# Altium footprint library StandardCase.PcbLib: 209 footprints (part 4 of 14)
Each footprint in its own frame and in the unit in brackets; x right, y up, seen from the top. Pads: shape width x height; smd on the part's side, far side on the other; paste and mask are expansions set on the pad; w line width, h text height; cw(c..) or ccw(c..) is an arc to the next point about the centre after c.
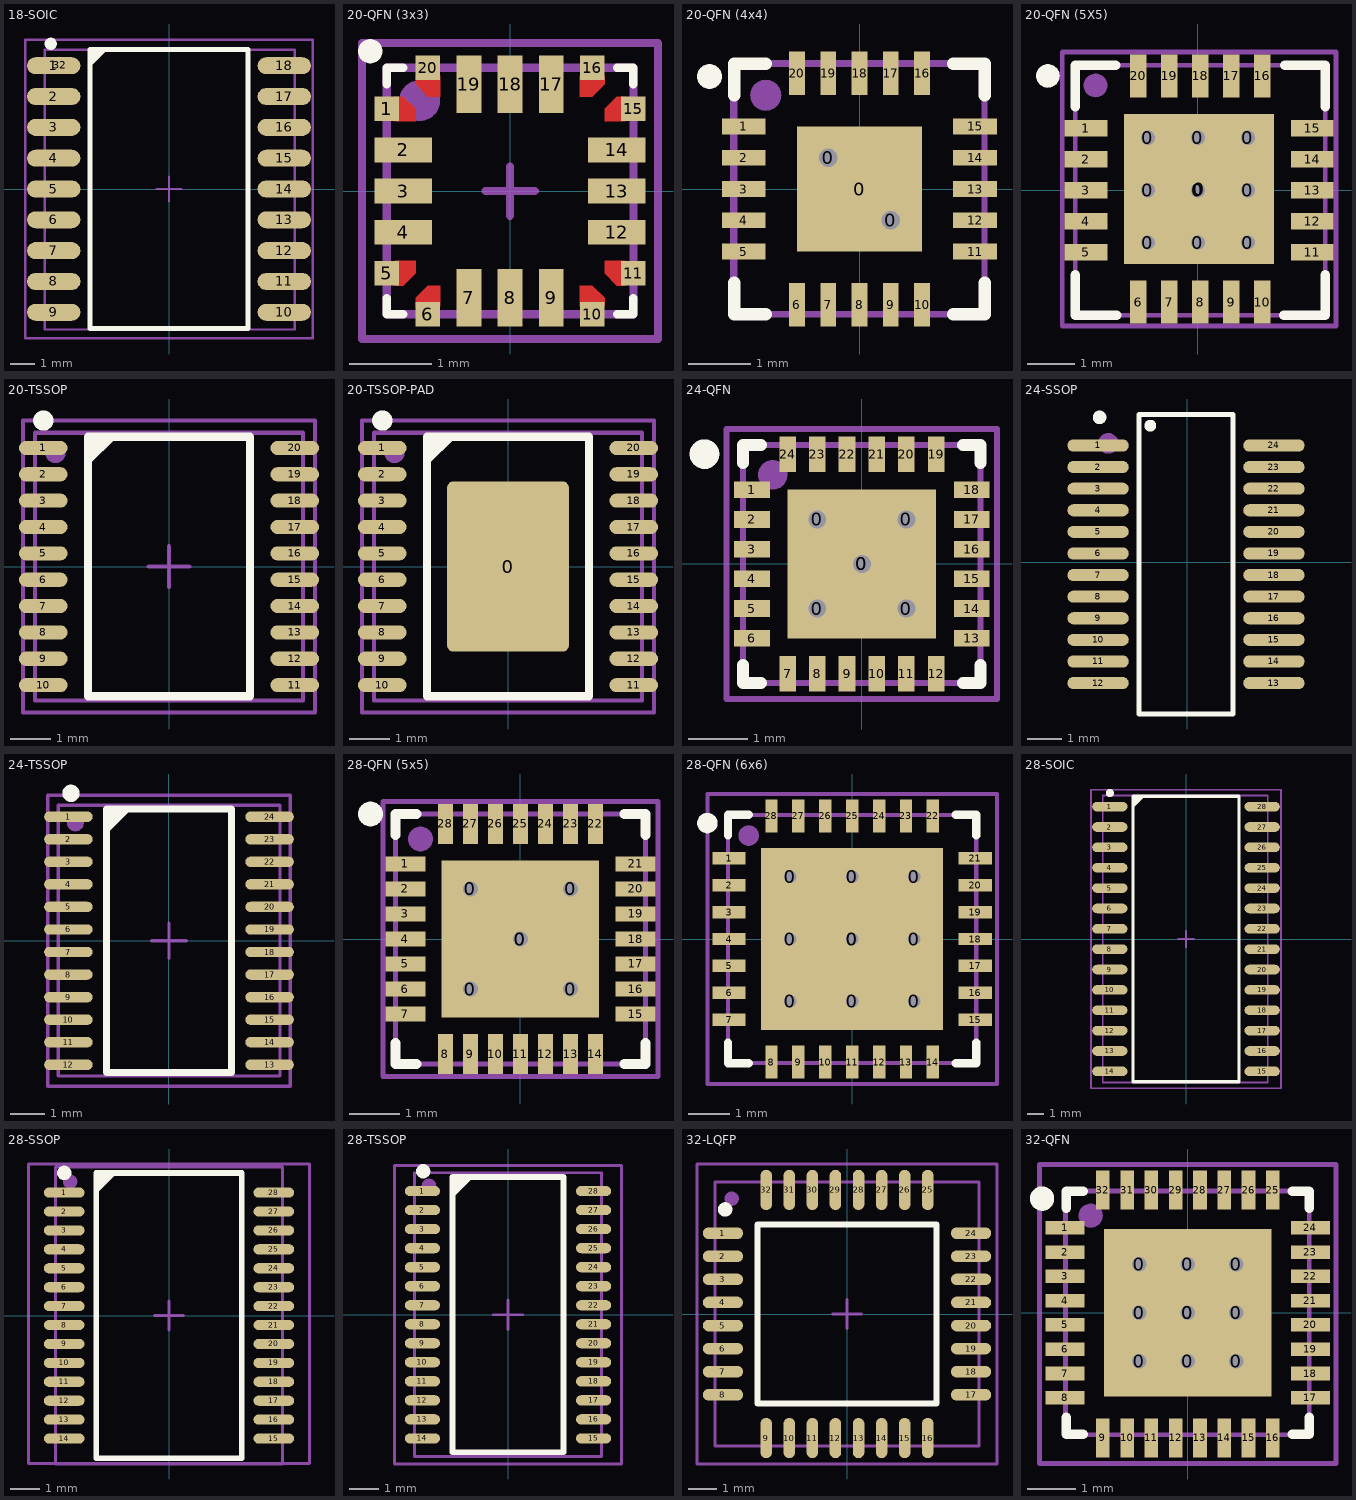
[diagram p3: the footprints below, top view; thin cyan lines are the x and y axes]

## 18-SOIC [mm] "pitch 1.27 mm"
height 2.65
pads (19):
  oval 2.2x0.7 smd: 1(-4.75,5.08) 2(-4.75,3.81) 3(-4.75,2.54) 4(-4.75,1.27) 5(-4.75,0) 6(-4.75,-1.27) 7(-4.75,-2.54) 8(-4.75,-3.81) 9(-4.75,-5.08) 10(4.75,-5.08) 11(4.75,-3.81) 12(4.75,-2.54) 13(4.75,-1.27) 14(4.75,0) 15(4.75,1.27) 16(4.75,2.54) 17(4.75,3.81) 18(4.75,5.08)
  round 0.7 on Mech1: 32(-4.5,5.1)
Top Overlay:
  region: -3.25,5.75 -3.25,5.03 -2.53,5.75
  lines w0.2: -3.25,-5.75 -3.25,5.75 3.25,5.75 3.25,-5.75 -3.25,-5.75
  lines w0.25: -4.75,6 ccw(c-4.874,5.983) -4.749,5.983
Mechanical 1:
  lines w0.1: -5.125,-5.79 -5.125,5.74 5.175,5.74 5.175,-5.79 -5.125,-5.79
Mechanical 15:
  lines w0.1: -0.5,0 0.5,0 ; 0,-0.5 0,0.5 ; -5.925,-6.15 -5.925,6.15 5.925,6.15 5.925,-6.15 -5.925,-6.15
3D body "SW3dPS-SOIC18-300.STEP": height 2.65, standoff 0, extent -5.125,-5.79 5.175,5.74

## 20-QFN (3x3) [mm] "3x3 mm, pitch 0.5 mm"
pads (22):
  rect 0.3x0.3 smd: 1(-1.5,1) 5(-1.5,-1) 6(-1,-1.5) 10(1,-1.5) 11(1.5,-1) 15(1.5,1) 16(1,1.5) 20(-1,1.5)
  rect 0.7x0.3 smd: 2(-1.3,0.5) 3(-1.3,0) 4(-1.3,-0.5) 12(1.3,-0.5) 13(1.3,0) 14(1.3,0.5)
  rect 0.3x0.7 smd: 7(-0.5,-1.3) 8(0,-1.3) 9(0.5,-1.3) 17(0.5,1.3) 18(0,1.3) 19(-0.5,1.3)
  round 0.3 on Top Overlay: ""(-1.7,1.7)
  round 0.5 on Mech1: ""(-1.1,1.1)
Top Layer:
  region: -1.4,1.15 -1.3,1.15 -1.15,1 -1.15,0.85 -1.4,0.85
  region: -1.15,1.4 -1.15,1.3 -1,1.15 -0.85,1.15 -0.85,1.4
  region: 1.4,1.15 1.3,1.15 1.15,1 1.15,0.85 1.4,0.85
  region: 1.15,1.4 1.15,1.3 1,1.15 0.85,1.15 0.85,1.4
  region: -1.4,-1.15 -1.3,-1.15 -1.15,-1 -1.15,-0.85 -1.4,-0.85
  region: -1.15,-1.4 -1.15,-1.3 -1,-1.15 -0.85,-1.15 -0.85,-1.4
  region: 1.15,-1.4 1.15,-1.3 1,-1.15 0.85,-1.15 0.85,-1.4
  region: 1.4,-1.15 1.3,-1.15 1.15,-1 1.15,-0.85 1.4,-0.85
Top Overlay:
  lines w0.1: -1.5,-1.3 -1.5,-1.5 -1.3,-1.5 ; -1.5,1.3 -1.5,1.5 -1.3,1.5 ; 1.3,-1.5 1.5,-1.5 1.5,-1.3 ; 1.3,1.5 1.5,1.5 1.5,1.3
Top Solder:
  region: 0.75,-0.85 0.85,-0.85 0.85,-0.75 1.25,-0.75 1.25,-1.25 0.75,-1.25
  region: -0.75,-0.85 -0.85,-0.85 -0.85,-0.75 -1.25,-0.75 -1.25,-1.25 -0.75,-1.25
  region: -0.75,0.85 -0.85,0.85 -0.85,0.75 -1.25,0.75 -1.25,1.25 -0.75,1.25
  region: 0.75,0.85 0.85,0.85 0.85,0.75 1.25,0.75 1.25,1.25 0.75,1.25
Mechanical 1:
  lines w0.1: -1.5,-1.5 -1.5,1.5 1.5,1.5 1.5,-1.5 -1.5,-1.5
Mechanical 15:
  lines w0.1: -0.3,0 0.3,0 ; 0,-0.3 0,0.3 ; -1.8,-1.8 -1.8,1.8 1.8,1.8 1.8,-1.8 -1.8,-1.8
3D body "User Library-UFQFPN20-1.STEP": height 0.55, standoff 0, extent -1.5,-1.5 1.5,1.5

## 20-QFN (4x4) [mm] "4x4 mm, pitch 0.5 mm, power pad"
height 0.75
pads (25):
  round 0.7 hole 0.3: 0(-0.5,0.5) 0(0.5,-0.5)
  rect 2x2 smd: 0(0,0)
  rect 0.7x0.25 smd: 1(-1.85,1) 2(-1.85,0.5) 3(-1.85,0) 4(-1.85,-0.5) 5(-1.85,-1) 11(1.85,-1) 12(1.85,-0.5) 13(1.85,0) 14(1.85,0.5) 15(1.85,1)
  rect 0.25x0.7 smd: 6(-1,-1.85) 7(-0.5,-1.85) 8(0,-1.85) 9(0.5,-1.85) 10(1,-1.85) 16(1,1.85) 17(0.5,1.85) 18(0,1.85) 19(-0.5,1.85) 20(-1,1.85)
  round 0.4 on Top Overlay: ""(-2.4,1.8)
  round 0.5 on Mech1: ""(-1.5,1.5)
Top Overlay:
  lines w0.2: -2,-1.5 -2,-2 -1.5,-2 ; -2,1.5 -2,2 -1.5,2 ; 1.5,-2 2,-2 2,-1.5 ; 1.5,2 2,2 2,1.5
Mechanical 1:
  lines w0.1: -2.02,-2.01 2,-2.01 2,2.01 -2.02,2.01 -2.02,-2.01
Mechanical 15:
  lines w0.1: -0.2,0 0.2,0 ; 0,-0.2 0,0.2 ; -2,-2 2,-2 2,2 -2,2 -2,-2
3D body "User Library-QFN20_4x4x0_8.STEP": height 0.78, standoff -0.02, extent -2.02,-2.01 2,2.01

## 20-QFN (5X5) [mm] "5x5 mm, pitch 0.65 mm, power pad"
pads (32):
  round 0.7 hole 0.3: 0(-1.05,-1.1) 0(-1.05,0) 0(-1.05,1.1) 0(0,-1.1) 0(0,0) 0(0,1.1) 0(1.05,-1.1) 0(1.05,0) 0(1.05,1.1)
  rect 3.15x3.15 smd: 0(0.025,0.025)
  rect 0.9x0.35 smd: 1(-2.35,1.3) 2(-2.35,0.65) 3(-2.35,0) 4(-2.35,-0.65) 5(-2.35,-1.3) 11(2.4,-1.3) 12(2.4,-0.65) 13(2.4,0) 14(2.4,0.65) 15(2.4,1.3)
  rect 0.35x0.9 smd: 6(-1.25,-2.35) 7(-0.6,-2.35) 8(0.05,-2.35) 9(0.7,-2.35) 10(1.35,-2.35) 16(1.35,2.4) 17(0.7,2.4) 18(0.05,2.4) 19(-0.6,2.4) 20(-1.25,2.4)
  round 0.5 on Top Overlay: ""(-3.15,2.4)
  round 0.5 on Mech1: ""(-2.15,2.2)
Top Overlay:
  lines w0.2: -2.575,-1.775 -2.575,-2.625 -1.7,-2.625 ; -2.575,1.75 -2.575,2.625 -1.725,2.625 ; 1.8,-2.625 2.675,-2.625 2.675,-1.775 ; 1.825,2.625 2.675,2.625 2.675,1.75
Mechanical 1:
  lines w0.1: -2.575,-2.625 -2.575,2.625 2.675,2.625 2.675,-2.625 -2.575,-2.625
Mechanical 15:
  lines w0.1: -2.85,-2.85 -2.85,2.9 2.9,2.9 2.9,-2.85 -2.85,-2.85
3D body "User Library-VQFN-20-1.STEP": height 1, standoff -0.05, extent -2.575,-2.625 2.675,2.625

## 20-TSSOP [mm] "pitch 0.65 mm"
height 1.2
pads (21):
  oval 1.2x0.35 smd: 1(-3.1,2.925) 2(-3.1,2.275) 3(-3.1,1.625) 4(-3.1,0.975) 5(-3.1,0.325) 6(-3.1,-0.325) 7(-3.1,-0.975) 8(-3.1,-1.625) 9(-3.1,-2.275) 10(-3.1,-2.925) 11(3.1,-2.925) 12(3.1,-2.275) 13(3.1,-1.625) 14(3.1,-0.975) 15(3.1,-0.325) 16(3.1,0.325) 17(3.1,0.975) 18(3.1,1.625) 19(3.1,2.275) 20(3.1,2.925)
  round 0.5 on Mech1: ""(-2.8,2.8)
Top Overlay:
  circle w0.25: c-3.1,3.6 r0.125
  region: -2,3.2 -2,2.48 -1.28,3.2
  lines w0.2: -2,-3.2 2,-3.2 2,3.2 -2,3.2 -2,-3.2
Mechanical 1:
  lines w0.1: -3.3,-3.3 -3.3,3.3 3.3,3.3 3.3,-3.3 -3.3,-3.3
Mechanical 15:
  lines w0.1: -0.5,0 0.5,0 ; 0,-0.5 0,0.5 ; -3.6,-3.6 -3.6,3.6 3.6,3.6 3.6,-3.6 -3.6,-3.6
3D body "TSSOP-20.STEP": height 1.2, standoff 0, extent -3.3,-3.3 3.3,3.3

## 20-TSSOP-PAD [mm] "pitch 0.65 mm, power pad"
height 1.2
pads (22):
  rrect10% 3x4.2 smd: 0(0,0)
  oval 1.2x0.35 smd: 1(-3.1,2.925) 2(-3.1,2.275) 3(-3.1,1.625) 4(-3.1,0.975) 5(-3.1,0.325) 6(-3.1,-0.325) 7(-3.1,-0.975) 8(-3.1,-1.625) 9(-3.1,-2.275) 10(-3.1,-2.925) 11(3.1,-2.925) 12(3.1,-2.275) 13(3.1,-1.625) 14(3.1,-0.975) 15(3.1,-0.325) 16(3.1,0.325) 17(3.1,0.975) 18(3.1,1.625) 19(3.1,2.275) 20(3.1,2.925)
  round 0.5 on Mech1: ""(-2.8,2.8)
Top Overlay:
  circle w0.25: c-3.1,3.6 r0.125
  region: -2,3.2 -2,2.48 -1.28,3.2
  lines w0.2: -2,-3.2 2,-3.2 2,3.2 -2,3.2 -2,-3.2
Mechanical 1:
  lines w0.1: -3.3,-3.3 3.3,-3.3 3.3,3.3 -3.3,3.3 -3.3,-3.3
Mechanical 15:
  lines w0.1: -0.5,0 0.5,0 ; 0,-0.5 0,0.5 ; -3.6,-3.6 3.6,-3.6 3.6,3.6 -3.6,3.6 -3.6,-3.6
3D body "TSSOP-20.STEP": height 1.2, standoff 0, extent -3.3,-3.3 3.3,3.3

## 24-QFN [mm] "4x4 mm, pitch 0.5 mm, power pad"
height 0.75
pads (31):
  round 0.7 hole 0.3: 0(-0.75,-0.75) 0(-0.75,0.75) 0(0,0) 0(0.75,-0.75) 0(0.75,0.75)
  rect 2.5x2.5 smd: 0(0,0)
  rect 0.6x0.28 smd: 1(-1.85,1.25) 2(-1.85,0.75) 3(-1.85,0.25) 4(-1.85,-0.25) 5(-1.85,-0.75) 6(-1.85,-1.25) 13(1.85,-1.25) 14(1.85,-0.75) 15(1.85,-0.25) 16(1.85,0.25) 17(1.85,0.75) 18(1.85,1.25)
  rect 0.28x0.6 smd: 7(-1.25,-1.85) 8(-0.75,-1.85) 9(-0.25,-1.85) 10(0.25,-1.85) 11(0.75,-1.85) 12(1.25,-1.85) 19(1.25,1.85) 20(0.75,1.85) 21(0.25,1.85) 22(-0.25,1.85) 23(-0.75,1.85) 24(-1.25,1.85)
  round 0.5 on Mech1: ""(-1.5,1.5)
Top Overlay:
  circle w0.25: c-2.65,1.85 r0.125
  lines w0.2: -2,-1.7 -2,-2 -1.7,-2 ; -2,1.7 -2,2 -1.7,2 ; 1.7,-2 2,-2 2,-1.7 ; 1.7,2 2,2 2,1.7
Mechanical 1:
  lines w0.1: -2,-2 2,-2 2,2 -2,2 -2,-2
Mechanical 15:
  lines w0.1: -0.5,0 0.5,0 ; 0,-0.5 0,0.5 ; -2.275,-2.275 2.275,-2.275 2.275,2.275 -2.275,2.275 -2.275,-2.275
3D body "24-QFN (4x4 mm).step": height 0.75, standoff 0, extent -2,-2 2,2

## 24-SSOP [mm]
pads (24):
  oval 1.805x0.356 smd: 1(-2.628,3.437) 2(-2.628,2.802) 3(-2.628,2.167) 4(-2.628,1.532) 5(-2.628,0.897) 6(-2.628,0.262) 7(-2.628,-0.373) 8(-2.628,-1.008) 9(-2.628,-1.643) 10(-2.628,-2.278) 11(-2.628,-2.913) 12(-2.628,-3.548) 13(2.541,-3.548) 14(2.541,-2.913) 15(2.541,-2.278) 16(2.541,-1.643) 17(2.541,-1.008) 18(2.541,-0.373) 19(2.541,0.262) 20(2.541,0.897) 21(2.541,1.532) 22(2.541,2.167) 23(2.541,2.802) 24(2.541,3.437)
Top Overlay:
  circle w0.2: c-2.584,4.263 r0.1
  circle w0.175: c-1.094,4.019 r0.087
  lines w0.152: -1.421,-4.457 -1.421,4.346 1.334,4.346 1.334,-4.457 -1.421,-4.457
Mechanical 15:
  circle w0.3: c-2.33,3.501 r0.15
3D body: height 1.75, standoff 0, extent -2,-4.375 1.9,4.225

## 24-TSSOP [mm] "pitch 0.65 mm"
height 1.2
pads (25):
  rrect100% 1.4x0.3 smd: 1(-2.9,3.575)
  oval 1.4x0.3 smd: 2(-2.9,2.925) 3(-2.9,2.275) 4(-2.9,1.625) 5(-2.9,0.975) 6(-2.9,0.325) 7(-2.9,-0.325) 8(-2.9,-0.975) 9(-2.9,-1.625) 10(-2.9,-2.275) 11(-2.9,-2.925) 12(-2.9,-3.575) 13(2.9,-3.575) 14(2.9,-2.925) 15(2.9,-2.275) 16(2.9,-1.625) 17(2.9,-0.975) 18(2.9,-0.325) 19(2.9,0.325) 20(2.9,0.975) 21(2.9,1.625) 22(2.9,2.275) 23(2.9,2.925) 24(2.9,3.575)
  round 0.5 on Mech1: ""(-2.7,3.4)
Top Overlay:
  circle w0.25: c-2.825,4.25 r0.125
  region: -1.8,3.8 -1.8,3.08 -1.08,3.8
  lines w0.2: -1.8,-3.8 1.8,-3.8 1.8,3.8 -1.8,3.8 -1.8,-3.8
Mechanical 1:
  lines w0.1: -3.2,-3.9 3.2,-3.9 3.2,3.9 -3.2,3.9 -3.2,-3.9
Mechanical 15:
  lines w0.1: -0.5,0 0.5,0 ; 0,-0.5 0,0.5 ; -3.5,-4.2 3.5,-4.2 3.5,4.2 -3.5,4.2 -3.5,-4.2
3D body "TSSOP24.STEP": height 1.2, standoff 0, extent -3.2,-3.9 3.2,3.9

## 28-QFN (5x5) [mm] "5x5 mm, pitch 0.5 mm, power pad"
height 0.9
pads (36):
  round 0.7 hole 0.3: 0(-1,-1) 0(-1,1) 0(0,0) 0(1,-1) 0(1,1)
  rect 3.15x3.15 smd: 0(0,0)
  rect 0.8x0.3 smd: 1(-2.3,1.5) 2(-2.3,1) 3(-2.3,0.5) 4(-2.3,0) 5(-2.3,-0.5) 6(-2.3,-1) 7(-2.3,-1.5) 15(2.3,-1.5) 16(2.3,-1) 17(2.3,-0.5) 18(2.3,0) 19(2.3,0.5) 20(2.3,1) 21(2.3,1.5)
  rect 0.3x0.8 smd: 8(-1.5,-2.3) 9(-1,-2.3) 10(-0.5,-2.3) 11(0,-2.3) 12(0.5,-2.3) 13(1,-2.3) 14(1.5,-2.3) 22(1.5,2.3) 23(1,2.3) 24(0.5,2.3) 25(0,2.3) 26(-0.5,2.3) 27(-1,2.3) 28(-1.5,2.3)
  round 0.5 on Top Overlay: ""(-3,2.5)
  round 0.5 on Mech1: ""(-2,2)
Top Overlay:
  lines w0.2: -2.5,-2.075 -2.5,-2.5 -2.075,-2.5 ; -2.5,2.075 -2.5,2.5 -2.075,2.5 ; 2.075,-2.5 2.5,-2.5 2.5,-2.075 ; 2.075,2.5 2.5,2.5 2.5,2.075
Mechanical 1:
  lines w0.1: -2.5,-2.5 2.5,-2.5 2.5,2.5 -2.5,2.5 -2.5,-2.5
Mechanical 15:
  lines w0.1: -0.5,0 0.5,0 ; 0,-0.5 0,0.5 ; -2.75,-2.75 -2.75,2.75 2.75,2.75 2.75,-2.75 -2.75,-2.75
3D body "28-QFN, 0.5 mm.step": height 0.9, standoff 0, extent -2.5,-2.5 2.5,2.5

## 28-QFN (6x6) [mm] "6x6 mm, pitch 0.65 mm, power pad"
height 0.9
pads (40):
  round 0.7 hole 0.3: 0(-1.5,-1.5) 0(-1.5,0) 0(-1.5,1.5) 0(0,-1.5) 0(0,0) 0(0,1.5) 0(1.5,-1.5) 0(1.5,0) 0(1.5,1.5)
  rect 4.4x4.4 smd: 0(0,0)
  rect 0.8x0.3 smd: 1(-2.975,1.95) 2(-2.975,1.3) 3(-2.975,0.65) 4(-2.975,0) 5(-2.975,-0.65) 6(-2.975,-1.3) 7(-2.975,-1.95) 15(2.975,-1.95) 16(2.975,-1.3) 17(2.975,-0.65) 18(2.975,0) 19(2.975,0.65) 20(2.975,1.3) 21(2.975,1.95)
  rect 0.3x0.8 smd: 8(-1.95,-2.975) 9(-1.3,-2.975) 10(-0.65,-2.975) 11(0,-2.975) 12(0.65,-2.975) 13(1.3,-2.975) 14(1.95,-2.975) 22(1.95,2.975) 23(1.3,2.975) 24(0.65,2.975) 25(0,2.975) 26(-0.65,2.975) 27(-1.3,2.975) 28(-1.95,2.975)
  round 0.5 on Top Overlay: ""(-3.5,2.8)
  round 0.5 on Mech1: ""(-2.5,2.5)
Top Overlay:
  lines w0.2: -3,-2.5 -3,-3 -2.5,-3 ; -3,2.5 -3,3 -2.5,3 ; 2.5,-3 3,-3 3,-2.5 ; 2.5,3 3,3 3,2.5
Mechanical 1:
  lines w0.1: -3,-3 -3,3 3,3 3,-3 -3,-3
Mechanical 15:
  lines w0.1: -0.5,0 0,0 0.5,0 ; 0,-0.5 0,0.5 ; -3.5,-3.5 -3.5,3.5 3.5,3.5 3.5,-3.5 -3.5,-3.5
3D body "User Library-QFN-28.STEP": height 1.02, standoff -0.08, extent -3,-3 3,3

## 28-SOIC [mm] "pitch 1.27 mm"
height 2.65
pads (29):
  rrect100% 2.2x0.6 smd: 1(-4.75,8.255) 2(-4.75,6.985) 3(-4.75,5.715) 4(-4.75,4.445) 5(-4.75,3.175) 6(-4.75,1.905) 7(-4.75,0.635) 8(-4.75,-0.635) 9(-4.75,-1.905) 10(-4.75,-3.175) 11(-4.75,-4.445) 12(-4.75,-5.715) 13(-4.75,-6.985) 14(-4.75,-8.255) 15(4.75,-8.255) 16(4.75,-6.985) 17(4.75,-5.715) 18(4.75,-4.445) 19(4.75,-3.175) 20(4.75,-1.905) 21(4.75,-0.635) 22(4.75,0.635) 23(4.75,1.905) 24(4.75,3.175) 25(4.75,4.445) 26(4.75,5.715) 27(4.75,6.985) 28(4.75,8.255)
  round 0.5 on Mech1: ""(-4.5,8.3)
Top Overlay:
  circle w0.25: c-4.75,9.105 r0.125
  region: -3.3,8.9 -3.3,8.18 -2.58,8.9
  lines w0.2: -3.3,-8.9 3.3,-8.9 3.3,8.9 -3.3,8.9 -3.3,-8.9
Mechanical 1:
  lines w0.1: -5.2,-8.95 5.1,-8.95 5.1,8.95 -5.2,8.95 -5.2,-8.95
Mechanical 15:
  lines w0.1: -0.5,0 0.5,0 ; 0,-0.5 0,0.5 ; -5.925,-9.3 5.925,-9.3 5.925,9.3 -5.925,9.3 -5.925,-9.3
3D body "User Library-28-SOIC.STEP": height 2.73, standoff -0.03, extent -5.2,-8.95 5.1,8.95

## 28-SSOP [mm] "pitch 0.65 mm"
pads (30):
  rrect100% 1.4x0.35 smd: 1(-3.6,4.225) 2(-3.6,3.575) 3(-3.6,2.925) 4(-3.6,2.275) 5(-3.6,1.625) 6(-3.6,0.975) 7(-3.6,0.325) 8(-3.6,-0.325) 9(-3.6,-0.975) 10(-3.6,-1.625) 11(-3.6,-2.275) 12(-3.6,-2.925) 13(-3.6,-3.575) 14(-3.6,-4.225) 15(3.6,-4.225) 16(3.6,-3.575) 17(3.6,-2.925) 18(3.6,-2.275) 19(3.6,-1.625) 20(3.6,-0.975) 21(3.6,-0.325) 22(3.6,0.325) 23(3.6,0.975) 24(3.6,1.625) 25(3.6,2.275) 26(3.6,2.925) 27(3.6,3.575) 28(3.6,4.225)
  round 0.5 on Top Overlay: ""(-3.6,4.9)
  round 0.5 on Mech1: ""(-3.4,4.6)
Top Overlay:
  region: -2.5,4.9 -2.5,4.18 -1.78,4.9
  lines w0.2: -2.5,-4.9 2.5,-4.9 2.5,4.9 -2.5,4.9 -2.5,-4.9
Mechanical 1:
  lines w0.1: -3.9,-5.1 -3.9,5.1 3.9,5.1 3.9,-5.1 -3.9,-5.1
Mechanical 15:
  lines w0.1: -0.5,0 0.5,0 ; 0,-0.5 0,0.5 ; -4.826,-5.08 -4.826,5.207 4.826,5.207 4.826,-5.08 -4.826,-5.08
3D body "User Library-SSOP-28-1.STEP": height 2.15, standoff 0, extent -3.878,-5.165 3.878,5.165

## 28-TSSOP [mm] "pitch 0.65 mm"
height 2.65
pads (30):
  oval 1.2x0.35 smd: 1(-2.925,4.225) 2(-2.925,3.575) 3(-2.925,2.925) 4(-2.925,2.275) 5(-2.925,1.625) 6(-2.925,0.975) 7(-2.925,0.325) 8(-2.925,-0.325) 9(-2.925,-0.975) 10(-2.925,-1.625) 11(-2.925,-2.275) 12(-2.925,-2.925) 13(-2.925,-3.575) 14(-2.925,-4.225) 15(2.925,-4.225) 16(2.925,-3.575) 17(2.925,-2.925) 18(2.925,-2.275) 19(2.925,-1.625) 20(2.925,-0.975) 21(2.925,-0.325) 22(2.925,0.325) 23(2.925,0.975) 24(2.925,1.625) 25(2.925,2.275) 26(2.925,2.925) 27(2.925,3.575) 28(2.925,4.225)
  round 0.5 on Top Overlay: ""(-2.9,4.9)
  round 0.5 on Mech1: ""(-2.7,4.4)
Top Overlay:
  region: -1.9,4.7 -1.9,3.98 -1.18,4.7
  lines w0.2: -1.9,-4.7 -1.9,4.7 1.9,4.7 1.9,-4.7 -1.9,-4.7
Mechanical 1:
  lines w0.1: -3.2,-4.85 -3.2,4.85 3.2,4.85 3.2,-4.85 -3.2,-4.85
Mechanical 15:
  lines w0.1: -0.5,0 0.5,0 ; 0,-0.5 0,0.5 ; -3.875,-5.1 -3.875,5.1 3.875,5.1 3.875,-5.1 -3.875,-5.1
3D body "User Library-TSSOP-28.STEP": height 1.2, standoff 0, extent -3.2,-4.85 3.2,4.85

## 32-LQFP [mm] "pitch 0.8 mm"
height 1.6
pads (33):
  rrect100% 1.4x0.4 smd: 1(-4.3,2.8) 2(-4.3,2) 3(-4.3,1.2) 4(-4.3,0.4) 5(-4.3,-0.4) 6(-4.3,-1.2) 7(-4.3,-2) 8(-4.3,-2.8) 17(4.3,-2.8) 18(4.3,-2) 19(4.3,-1.2) 20(4.3,-0.4) 21(4.3,0.4) 22(4.3,1.2) 23(4.3,2) 24(4.3,2.8)
  rrect100% 0.4x1.4 smd: 9(-2.8,-4.3) 10(-2,-4.3) 11(-1.2,-4.3) 12(-0.4,-4.3) 13(0.4,-4.3) 14(1.2,-4.3) 15(2,-4.3) 16(2.8,-4.3) 25(2.8,4.3) 26(2,4.3) 27(1.2,4.3) 28(0.4,4.3) 29(-0.4,4.3) 30(-1.2,4.3) 31(-2,4.3) 32(-2.8,4.3)
  round 0.5 on Mech1: ""(-4,4)
Top Overlay:
  circle w0.25: c-4.225,3.625 r0.125
  lines w0.2: -3.1,-3.1 -3.1,3.1 3.1,3.1 3.1,-3.1 -3.1,-3.1
Mechanical 1:
  lines w0.1: -4.572,-4.572 4.572,-4.572 4.572,4.572 -4.572,4.572 -4.572,-4.572
Mechanical 15:
  lines w0.1: -0.5,0 0.5,0 ; 0,-0.5 0,0.5 ; -5.2,-5.2 -5.2,5.2 5.2,5.2 5.2,-5.2 -5.2,-5.2
3D body "User Library-LQFP32-2.STEP": height 1.62, standoff -0.01, extent -4.572,-4.572 4.572,4.572

## 32-QFN [mm] "5x5 mm, pitch 0.5 mm, power pad"
height 1
pads (43):
  round 0.7 hole 0.3: 0(-1,-1) 0(-1,0) 0(-1,1) 0(0,-1) 0(0,0) 0(0,1) 0(1,-1) 0(1,0) 0(1,1)
  rect 3.45x3.45 smd paste-1.725 mask+0.07: 0(0,0)
  rect 0.8x0.28 smd paste-0.025 mask+0.07: 1(-2.525,1.75) 2(-2.525,1.25) 3(-2.525,0.75) 4(-2.525,0.25) 5(-2.525,-0.25) 6(-2.525,-0.75) 7(-2.525,-1.25) 8(-2.525,-1.75) 17(2.525,-1.75) 18(2.525,-1.25) 19(2.525,-0.75) 20(2.525,-0.25) 21(2.525,0.25) 22(2.525,0.75) 23(2.525,1.25) 24(2.525,1.75)
  rect 0.28x0.8 smd paste-0.025 mask+0.07: 9(-1.75,-2.575) 10(-1.25,-2.575) 11(-0.75,-2.575) 12(-0.25,-2.575) 13(0.25,-2.575) 14(0.75,-2.575) 15(1.25,-2.575) 16(1.75,-2.575) 25(1.75,2.525) 26(1.25,2.525) 27(0.75,2.525) 28(0.25,2.525) 29(-0.25,2.525) 30(-0.75,2.525) 31(-1.25,2.525) 32(-1.75,2.525)
  round 0.5 on Mech1: ""(-2,2)
Top Overlay:
  circle w0.25: c-3,2.35 r0.125
  lines w0.2: -2.5,-2.15 -2.5,-2.5 -2.15,-2.5 ; -2.5,2.15 -2.5,2.5 -2.15,2.5 ; 2.15,-2.5 2.5,-2.5 2.5,-2.15 ; 2.15,2.5 2.5,2.5 2.5,2.15
Top Paste:
  region: -0.15,1.6 -1.6,1.6 -1.6,0.15 -0.15,0.15
  rectangle: 0.15,0.15 1.6,1.6
  rectangle: 0.15,-1.6 1.6,-0.15
  region: -0.15,-0.15 -1.6,-0.15 -1.6,-1.6 -0.15,-1.6
Mechanical 1:
  lines w0.1: -2.519,-2.51 2.501,-2.51 2.501,2.51 -2.519,2.51 -2.519,-2.51
Mechanical 15:
  lines w0.1: -0.5,0 0.5,0 ; 0,-0.5 0,0.5 ; -3.05,-3.1 -3.05,3.05 3.05,3.05 3.05,-3.1 -3.05,-3.1
3D body "User Library-UFQFPN-32.STEP": height 0.55, standoff 0, extent -2.5,-2.5 2.5,2.5